# Altium footprint library Footprint_Vlad.PcbLib: 392 footprints (part 9 of 25)
Each footprint in its own frame and in the unit in brackets; x right, y up, seen from the top. Pads: shape width x height; smd on the part's side, far side on the other; paste and mask are expansions set on the pad; w line width, h text height; cw(c..) or ccw(c..) is an arc to the next point about the centre after c.
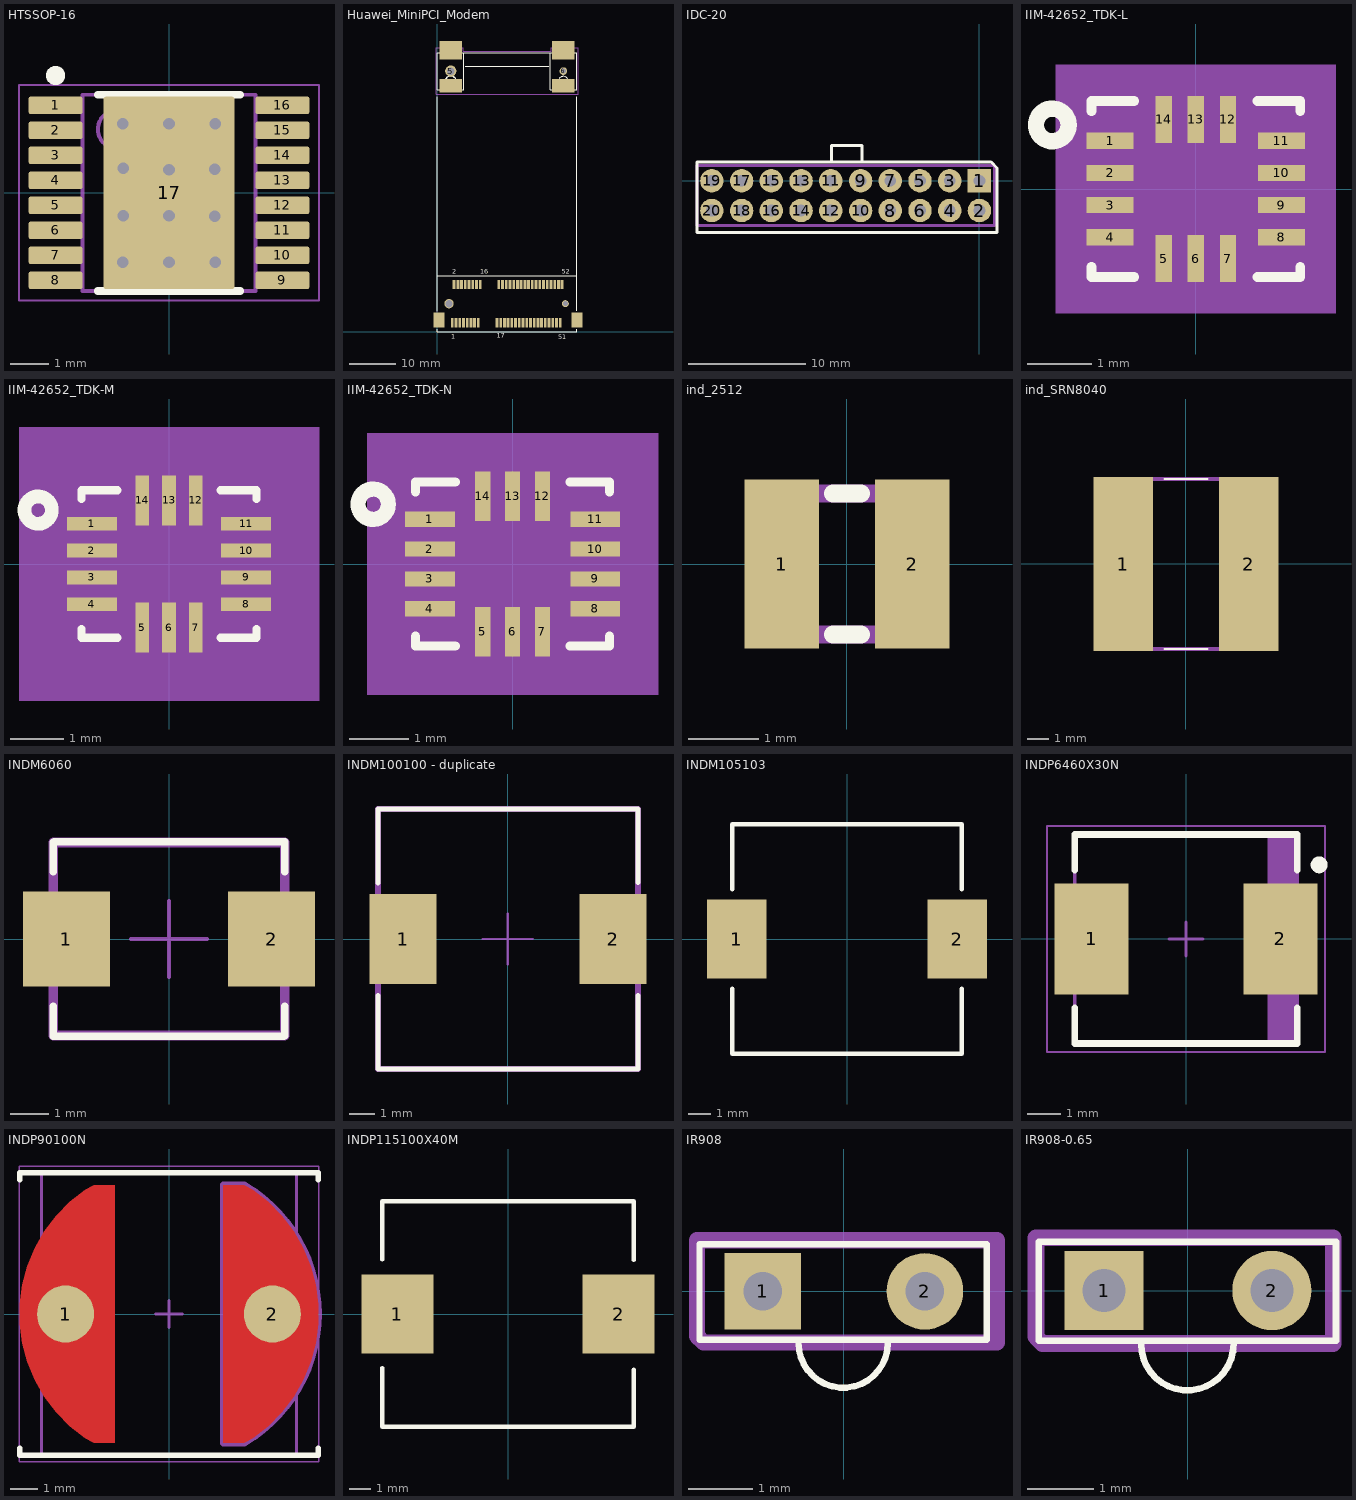
[diagram p8: the footprints below, top view; thin cyan lines are the x and y axes]

## HTSSOP-16 [mm] "SOP, 16-Leads, Body 5.1x4.5mm, Pitch 0.65mm, Thermal Pad 2.46x2.31mm, IPC Medium Density"
height 1.2
pads (17):
  rrect22% 1.4x0.45 smd: 1(-2.95,2.275) 2(-2.95,1.625) 3(-2.95,0.975) 4(-2.95,0.325) 5(-2.95,-0.325) 6(-2.95,-0.975) 7(-2.95,-1.625) 8(-2.95,-2.275) 9(2.95,-2.275) 10(2.95,-1.625) 11(2.95,-0.975) 12(2.95,-0.325) 13(2.95,0.325) 14(2.95,0.975) 15(2.95,1.625) 16(2.95,2.275)
  rrect3% 3.4x5 smd paste-1.7 mask-1.7: 17(0,0)
via 0,1.8 diameter 0.6 hole 0.3
via -1.2,1.8 diameter 0.6 hole 0.3
via 1.2,1.8 diameter 0.6 hole 0.3
via -1.2,-1.8 diameter 0.6 hole 0.3
via 0,-1.8 diameter 0.6 hole 0.3
via 1.2,-1.8 diameter 0.6 hole 0.3
via 0,0.6 diameter 0.6 hole 0.3
via 0,-0.6 diameter 0.6 hole 0.3
via -1.194,-0.6 diameter 0.6 hole 0.3
via 1.194,-0.61 diameter 0.6 hole 0.3
via 1.194,0.61 diameter 0.6 hole 0.3
via -1.194,0.635 diameter 0.6 hole 0.3
Top Overlay:
  circle w0.25: c-2.95,3.05 r0.125
  lines w0.2: -1.85,-2.55 1.85,-2.55 ; -1.85,2.55 1.85,2.55
Top Solder:
  lines w0.2: -1.2,1.8 -1.194,1.8 ; 1.194,1.8 1.2,1.8
Mechanical 1:
  text ".Designator" at -1.778,3.048 h1.02
Mechanical 13:
  circle w0.1: c-1.35,1.65 r0.5
  lines w0.1: -2.25,-2.55 2.25,-2.55 2.25,2.55 -2.25,2.55 -2.25,-2.55
Mechanical 15:
  lines w0.05: -3.9,-2.8 3.9,-2.8 3.9,2.8 -3.9,2.8 -3.9,-2.8
  lines w0.1: -0.5,0 0.5,0 ; 0,-0.5 0,0.5
3D body "MXA16A.stp": height 1, standoff 0, extent -3.209,-2.5 3.209,2.5

## Huawei_MiniPCI_Modem [mm]
pads (62):
  rect 0.6x2 smd: 1(3.225,1.925) 2(3.625,10.125) 3(4.025,1.925) 4(4.425,10.125) 5(4.825,1.925) 6(5.225,10.125) 7(5.625,1.925) 8(6.025,10.125) 9(6.425,1.925) 10(6.825,10.125) 11(7.225,1.925) 12(7.625,10.125) 13(8.025,1.925) 14(8.425,10.125) 15(8.825,1.925) 16(9.225,10.125) 17(12.825,1.925) 18(13.225,10.125) 19(13.625,1.925) 20(14.025,10.125) 21(14.425,1.925) 22(14.825,10.125) 23(15.225,1.925) 24(15.625,10.125) 25(16.025,1.925) 26(16.425,10.125) 27(16.825,1.925) 28(17.225,10.125) 29(17.625,1.925) 30(18.025,10.125) 31(18.425,1.925) 32(18.825,10.125) 33(19.225,1.925) 34(19.625,10.125) 35(20.025,1.925) 36(20.425,10.125) 37(20.825,1.925) 38(21.225,10.125) 39(21.625,1.925) 40(22.025,10.125) 41(22.425,1.925) 42(22.825,10.125) 43(23.225,1.925) 44(23.625,10.125) 45(24.025,1.925) 46(24.425,10.125) 47(24.825,1.925) 48(25.225,10.125) 49(25.625,1.925) 50(26.025,10.125) 51(26.425,1.925) 52(26.825,10.125)
  round 2.4 hole 1.6: 5(2.9,56)
  round 1.65 hole 1.1: 6(27.1,56)
  rect 2.3x3.2 smd: ""(0.375,2.525) ""(30.025,2.525)
  round 2 hole 1.6: ""(2.525,6.025)
  rect 4.8x3 smd: ""(2.9,52.85) ""(27.1,52.85)
  rect 4.8x4 smd: ""(2.9,60.5) ""(27.1,60.5)
  round 1.5 hole 1.1: ""(27.525,6.025)
Top Overlay:
  circle w0.254: c27.1,53.75 r1.1
  circle w0.254: c2.9,53.75 r1.15
  circle w0.254: c2.9,53.75 r1.25
  lines w0.15: 0.025,0.525 0.025,0.025 30.025,0.025 30.025,0.525 ; 0.025,4.425 0.025,12.025 ; 0.025,50.525 0.025,12.025 ; 6.025,57.025 23.925,57.025 ; 30.025,4.525 30.025,12.025 ; 30.025,50.525 30.025,12.025 ; 0.025,12.025 30.025,12.025
  lines w0.152: 0,52.025 0,59.975 ; 0,52.025 0,59.975 ; 0,52.025 5.73,52.025 ; 0,52.025 5.73,52.025 ; 0,59.975 5.73,59.975 ; 0,59.975 5.73,59.975 ; 5.73,52.025 5.73,59.975 ; 5.73,52.025 5.73,59.975 ; 5.73,59.975 24.27,59.975 ; 5.73,59.975 24.27,59.975 ; 24.27,52.025 24.27,59.975 ; 24.27,52.025 24.27,59.975 ; 24.27,52.025 30,52.025 ; 24.27,52.025 30,52.025 ; 24.27,59.975 30,59.975 ; 24.27,59.975 30,59.975 ; 30,52.025 30,59.975 ; 30,52.025 30,59.975
  text "1" at 3.025,-1.475 h1
  text "2" at 3.225,12.425 h1
  text "51" at 26.025,-1.575 h1
  text "52" at 26.725,12.425 h1
  text "17" at 12.825,-1.275 h1
  text "16" at 9.225,12.425 h1
Mechanical 15:
  lines w0.2: -0.25,51 -0.25,61 5.575,61 5.575,60.225 24.45,60.225 24.45,61 30.25,61 30.25,51 -0.25,51
3D body "679100002.stp": height 4.1, standoff -0.5, extent -0.003,0.945 29.997,11.145
3D body "Mini PCI Express Card 1mm Thick, 52 Pin, 0.8mm Pitch.STEP": height 2.55, standoff 1.45, extent -0.014,5.588 29.986,56.538
3D body "480994000.stp": height 4.85, standoff -0.7, extent 0.775,51.771 29.225,61.131

## IDC-20 [mm]
pads (20):
  rect 2x2 hole 1: 1(0,0)
  round 2 hole 1: 2(0,-2.54) 3(-2.54,0) 4(-2.54,-2.54) 5(-5.08,0) 6(-5.08,-2.54) 7(-7.62,0) 8(-7.62,-2.54) 9(-10.15,0) 10(-10.15,-2.54) 11(-12.7,0) 12(-12.7,-2.54) 13(-15.24,0) 14(-15.24,-2.54) 15(-17.78,0) 16(-17.78,-2.54) 17(-20.32,0) 18(-20.32,-2.54) 19(-22.86,0) 20(-22.86,-2.54)
Top Overlay:
  lines w0.254: -12.65,1.6 -12.65,3 -10.05,3 -10.05,1.6 ; -24.13,-4.4 -24.13,1.6 1,1.6 1.5,1.1 1.5,-4.4 -24.13,-4.4
Mechanical 15:
  circle w0.254: c0,0 r0.1
  lines w0.254: -24.13,-3.8 1.3,-3.8 1.3,1.3 -24.13,1.3 -24.13,-3.8
  text ".Designator" at -11.2,1.6 h1.52
3D body "User Library-DS1013-20S (IDC-20MS CONNFLY).STEP": height 9, standoff -3.6, extent -28.03,-5.67 5.17,3.23

## IIM-42652_TDK-L [mm]
pads (14):
  rect 0.733x0.255 smd paste+0 mask+0: 1(-1.333,0.75) 2(-1.333,0.25) 3(-1.333,-0.25) 4(-1.333,-0.75) 8(1.333,-0.75) 9(1.333,-0.25) 10(1.333,0.25) 11(1.333,0.75)
  rect 0.255x0.733 smd paste+0 mask+0: 5(-0.5,-1.083) 6(0,-1.083) 7(0.5,-1.083) 12(0.5,1.083) 13(0,1.083) 14(-0.5,1.083)
Top Overlay:
  circle w0.254: c-2.235,0.998 r0.254
  lines w0.152: -1.626,-1.21 -1.626,-1.372 -0.96,-1.372 ; -1.626,1.21 -1.626,1.372 -0.96,1.372 ; 0.96,-1.372 1.626,-1.372 1.626,-1.21 ; 0.96,1.372 1.626,1.372 1.626,1.21
Assembly Bottom:
  region: 2.183,-1.933 -2.183,-1.933 -2.183,1.933 2.183,1.933
Mechanical 13:
  lines w0.025: -1.499,-0.025 -0.229,1.245 ; -1.5,-0.902 -1.499,-0.902 -1.499,-0.598 -1.5,-0.598 -1.5,-0.902 ; -1.5,-0.402 -1.499,-0.402 -1.499,-0.098 -1.5,-0.098 -1.5,-0.402 ; -1.5,0.098 -1.499,0.098 -1.499,0.402 -1.5,0.402 -1.5,0.098 ; -1.5,0.598 -1.499,0.598 -1.499,0.902 -1.5,0.902 -1.5,0.598 ; -1.499,-1.245 -1.499,1.245 1.499,1.245 1.499,-1.245 -1.499,-1.245 ; -0.652,-1.25 -0.348,-1.25 -0.348,-1.245 -0.652,-1.245 -0.652,-1.25 ; -0.652,1.245 -0.652,1.25 -0.348,1.25 -0.348,1.245 -0.652,1.245 ; -0.152,-1.25 0.152,-1.25 0.152,-1.245 -0.152,-1.245 -0.152,-1.25 ; -0.152,1.245 -0.152,1.25 0.152,1.25 0.152,1.245 -0.152,1.245 ; 0.348,-1.25 0.652,-1.25 0.652,-1.245 0.348,-1.245 0.348,-1.25 ; 0.348,1.245 0.348,1.25 0.652,1.25 0.652,1.245 0.348,1.245 ; 1.499,-0.902 1.5,-0.902 1.5,-0.598 1.499,-0.598 1.499,-0.902 ; 1.499,-0.402 1.5,-0.402 1.5,-0.098 1.499,-0.098 1.499,-0.402 ; 1.499,0.098 1.5,0.098 1.5,0.402 1.499,0.402 1.499,0.098 ; 1.499,0.598 1.5,0.598 1.5,0.902 1.499,0.902 1.499,0.598
  text "*" at -1.284,0.365 h1.27
Mechanical 15:
  region: -0.729,-1.346 -1.6,-1.346 -1.6,-0.979 -1.802,-0.979 -1.802,0.979 -1.6,0.979 -1.6,1.346 -0.729,1.346 -0.729,1.552 0.729,1.552 0.729,1.346 1.6,1.346 1.6,0.979 1.802,0.979 1.802,-0.979 1.6,-0.979 1.6,-1.346 0.729,-1.346 0.729,-1.552 -0.729,-1.552
  lines w0.152: -1.802,-0.979 -1.802,0.979 -1.6,0.979 -1.6,1.346 -0.729,1.346 -0.729,1.552 0.729,1.552 0.729,1.346 1.6,1.346 1.6,0.979 1.802,0.979 1.802,-0.979 1.6,-0.979 1.6,-1.346 0.729,-1.346 0.729,-1.552 -0.729,-1.552 -0.729,-1.346 -1.6,-1.346 -1.6,-0.979 -1.802,-0.979
3D body "IIM-42652_TDK.step": height 1.65, standoff 0, extent -1.5,-1.25 1.5,1.25

## IIM-42652_TDK-M [mm]
pads (14):
  rect 0.933x0.255 smd paste+0 mask+0: 1(-1.433,0.75) 2(-1.433,0.25) 3(-1.433,-0.25) 4(-1.433,-0.75) 8(1.433,-0.75) 9(1.433,-0.25) 10(1.433,0.25) 11(1.433,0.75)
  rect 0.255x0.933 smd paste+0 mask+0: 5(-0.5,-1.183) 6(0,-1.183) 7(0.5,-1.183) 12(0.5,1.183) 13(0,1.183) 14(-0.5,1.183)
Top Overlay:
  circle w0.254: c-2.433,1.003 r0.254
  lines w0.152: -1.626,-1.21 -1.626,-1.372 -0.96,-1.372 ; -1.626,1.21 -1.626,1.372 -0.96,1.372 ; 0.96,-1.372 1.626,-1.372 1.626,-1.21 ; 0.96,1.372 1.626,1.372 1.626,1.21
Assembly Bottom:
  region: 2.789,-2.539 -2.789,-2.539 -2.789,2.539 2.789,2.539
Mechanical 13:
  lines w0.025: -1.499,-0.025 -0.229,1.245 ; -1.5,-0.902 -1.5,-0.598 -1.499,-0.598 -1.499,-0.902 -1.5,-0.902 ; -1.5,-0.402 -1.5,-0.098 -1.499,-0.098 -1.499,-0.402 -1.5,-0.402 ; -1.5,0.098 -1.5,0.402 -1.499,0.402 -1.499,0.098 -1.5,0.098 ; -1.5,0.598 -1.5,0.902 -1.499,0.902 -1.499,0.598 -1.5,0.598 ; -1.499,-1.245 1.499,-1.245 1.499,1.245 -1.499,1.245 -1.499,-1.245 ; -0.652,-1.25 -0.652,-1.245 -0.348,-1.245 -0.348,-1.25 -0.652,-1.25 ; -0.652,1.245 -0.348,1.245 -0.348,1.25 -0.652,1.25 -0.652,1.245 ; -0.152,-1.25 -0.152,-1.245 0.152,-1.245 0.152,-1.25 -0.152,-1.25 ; -0.152,1.245 0.152,1.245 0.152,1.25 -0.152,1.25 -0.152,1.245 ; 0.348,-1.25 0.348,-1.245 0.652,-1.245 0.652,-1.25 0.348,-1.25 ; 0.348,1.245 0.652,1.245 0.652,1.25 0.348,1.25 0.348,1.245 ; 1.499,-0.902 1.499,-0.598 1.5,-0.598 1.5,-0.902 1.499,-0.902 ; 1.499,-0.402 1.499,-0.098 1.5,-0.098 1.5,-0.402 1.499,-0.402 ; 1.499,0.098 1.499,0.402 1.5,0.402 1.5,0.098 1.499,0.098 ; 1.499,0.598 1.499,0.902 1.5,0.902 1.5,0.598 1.499,0.598
  text "*" at -1.284,0.365 h1.27
Mechanical 15:
  region: -1.135,-1.753 -2.007,-1.753 -2.007,-1.385 -2.408,-1.385 -2.408,1.385 -2.007,1.385 -2.007,1.753 -1.135,1.753 -1.135,2.158 1.135,2.158 1.135,1.753 2.007,1.753 2.007,1.385 2.408,1.385 2.408,-1.385 2.007,-1.385 2.007,-1.753 1.135,-1.753 1.135,-2.158 -1.135,-2.158
  lines w0.152: -2.408,-1.385 -2.007,-1.385 -2.007,-1.753 -1.135,-1.753 -1.135,-2.158 1.135,-2.158 1.135,-1.753 2.007,-1.753 2.007,-1.385 2.408,-1.385 2.408,1.385 2.007,1.385 2.007,1.753 1.135,1.753 1.135,2.158 -1.135,2.158 -1.135,1.753 -2.007,1.753 -2.007,1.385 -2.408,1.385 -2.408,-1.385
3D body "IIM-42652_TDK.step": height 1.65, standoff 0, extent -1.5,-1.25 1.5,1.25

## IIM-42652_TDK-N [mm]
pads (14):
  rect 0.833x0.255 smd paste+0 mask+0: 1(-1.383,0.75) 2(-1.383,0.25) 3(-1.383,-0.25) 4(-1.383,-0.75) 8(1.383,-0.75) 9(1.383,-0.25) 10(1.383,0.25) 11(1.383,0.75)
  rect 0.255x0.833 smd paste+0 mask+0: 5(-0.5,-1.133) 6(0,-1.133) 7(0.5,-1.133) 12(0.5,1.133) 13(0,1.133) 14(-0.5,1.133)
Top Overlay:
  circle w0.254: c-2.333,1 r0.254
  lines w0.152: -1.626,-1.21 -1.626,-1.372 -0.96,-1.372 ; -1.626,1.21 -1.626,1.372 -0.96,1.372 ; 0.96,-1.372 1.626,-1.372 1.626,-1.21 ; 0.96,1.372 1.626,1.372 1.626,1.21
Assembly Bottom:
  region: 2.435,-2.185 -2.435,-2.185 -2.435,2.185 2.435,2.185
Mechanical 13:
  lines w0.025: -1.499,-0.025 -0.229,1.245 ; -1.5,-0.902 -1.5,-0.598 -1.499,-0.598 -1.499,-0.902 -1.5,-0.902 ; -1.5,-0.402 -1.5,-0.098 -1.499,-0.098 -1.499,-0.402 -1.5,-0.402 ; -1.5,0.098 -1.5,0.402 -1.499,0.402 -1.499,0.098 -1.5,0.098 ; -1.5,0.598 -1.5,0.902 -1.499,0.902 -1.499,0.598 -1.5,0.598 ; -1.499,-1.245 1.499,-1.245 1.499,1.245 -1.499,1.245 -1.499,-1.245 ; -0.652,-1.25 -0.652,-1.245 -0.348,-1.245 -0.348,-1.25 -0.652,-1.25 ; -0.652,1.245 -0.348,1.245 -0.348,1.25 -0.652,1.25 -0.652,1.245 ; -0.152,-1.25 -0.152,-1.245 0.152,-1.245 0.152,-1.25 -0.152,-1.25 ; -0.152,1.245 0.152,1.245 0.152,1.25 -0.152,1.25 -0.152,1.245 ; 0.348,-1.25 0.348,-1.245 0.652,-1.245 0.652,-1.25 0.348,-1.25 ; 0.348,1.245 0.652,1.245 0.652,1.25 0.348,1.25 0.348,1.245 ; 1.499,-0.902 1.499,-0.598 1.5,-0.598 1.5,-0.902 1.499,-0.902 ; 1.499,-0.402 1.499,-0.098 1.5,-0.098 1.5,-0.402 1.499,-0.402 ; 1.499,0.098 1.499,0.402 1.5,0.402 1.5,0.098 1.499,0.098 ; 1.499,0.598 1.499,0.902 1.5,0.902 1.5,0.598 1.499,0.598
  text "*" at -1.284,0.365 h1.27
Mechanical 15:
  region: -0.881,-1.499 -1.753,-1.499 -1.753,-1.131 -2.054,-1.131 -2.054,1.131 -1.753,1.131 -1.753,1.499 -0.881,1.499 -0.881,1.804 0.881,1.804 0.881,1.499 1.753,1.499 1.753,1.131 2.054,1.131 2.054,-1.131 1.753,-1.131 1.753,-1.499 0.881,-1.499 0.881,-1.804 -0.881,-1.804
  lines w0.152: -2.054,-1.131 -1.753,-1.131 -1.753,-1.499 -0.881,-1.499 -0.881,-1.804 0.881,-1.804 0.881,-1.499 1.753,-1.499 1.753,-1.131 2.054,-1.131 2.054,1.131 1.753,1.131 1.753,1.499 0.881,1.499 0.881,1.804 -0.881,1.804 -0.881,1.499 -1.753,1.499 -1.753,1.131 -2.054,1.131 -2.054,-1.131
3D body "IIM-42652_TDK.step": height 1.65, standoff 0, extent -1.5,-1.25 1.5,1.25

## ind_2512 [mm]
pads (2):
  rect 1.05x2.4 smd: 1(-0.925,0) 2(0.925,0)
Top Overlay:
  lines w0.254: -0.2,-1 0.2,-1 ; -0.2,1 0.2,1
Mechanical 13:
  lines w0.254: -1.25,-1 -1.25,1 1.25,1 1.25,-1 -1.25,-1

## ind_SRN8040 [mm]
pads (2):
  rect 2.8x8.2 smd: 1(-2.95,0) 2(2.95,0)
Top Overlay:
  lines w0.1: -1,-4 1,-4 ; -1,4 1,4
Mechanical 13:
  lines w0.2: -4,-4 4,-4 4,4 -4,4 -4,-4
3D body "SRN8040-2R2Y.stp": height 4, standoff 0, extent -4,-4 4,4

## INDM6060 [mm] "Moulded inductor 6x6mm"
height 4
pads (2):
  rect 2.3x2.5 smd: 1(-2.7,0) 2(2.7,0)
Top Overlay:
  lines w0.2: -3.048,-1.778 -3.048,-2.565 3.023,-2.565 ; -3.048,1.778 -3.048,2.54 ; -3.023,2.565 3.048,2.565 3.048,1.778 ; 3.048,-2.54 3.048,-1.778
Mechanical 15:
  lines w0.1: -1,0 1,0 ; 0,-1 0,1
  lines w0.254: -3.048,-2.54 3.048,-2.54 3.048,2.54 -3.048,2.54 -3.048,-2.54
  text ".Designator" at -5.1,5.5 h1.52
3D body "User Library-SMDinductor.step": height 2.9, standoff 0, extent -2.95,-2.6 2.95,2.6

## INDM100100 - duplicate [mm] "Moulded inductor 10x10mm"
height 4
pads (2):
  rect 2.7x3.6 smd: 1(-4.2,0) 2(4.2,0)
Top Overlay:
  lines w0.2: -5.2,-2.25 -5.2,-5.2 -0.4,-5.2 5.2,-5.2 5.2,-2.25 ; -5.2,2.25 -5.198,5.2 ; -5.2,5.2 -0.4,5.2 5.2,5.2 5.2,2.25
Mechanical 15:
  lines w0.1: -1,0 1,0 ; 0,-1 0,1
  lines w0.254: -5.2,-5.2 -5.2,5.2 5.2,5.2 5.2,-5.2 -5.2,-5.2
  text ".Designator" at -5.1,5.5 h1.52
3D body "User Library-B82464G4.step": height 4.81, standoff 0, extent -5.2,-5.2 5.2,5.2

## INDM105103 [mm] "Moulded inductor 10x10mm"
height 4
pads (2):
  rect 2.7x3.6 smd: 1(-5,0) 2(5,0)
Top Overlay:
  lines w0.2: -5.2,-2.25 -5.2,-5.2 -0.4,-5.2 5.2,-5.2 5.2,-2.25 ; -5.2,2.25 -5.198,5.2 ; -5.2,5.2 -0.4,5.2 5.2,5.2 5.2,2.25
3D body "User Library-cdrh104r.STEP": height 4, standoff 0, extent -5.277,-5.095 5.223,5.205

## INDP6460X30N [mm] "Precision Wire Wound Inductor, 2-Leads, Body 6,40x6,00mm, IPC Medium Density"
height 3
pads (2):
  rect 2.2x3.3 smd: 1(-2.8,0) 2(2.8,0)
Top Overlay:
  circle w0.25: c3.95,2.2 r0.125
  lines w0.2: -3.3,-2.05 -3.3,-3.1 3.3,-3.1 3.3,-2.05 ; -3.3,2.05 -3.3,3.1 3.3,3.1 3.3,2.05
Assembly Top:
  rectangle: 2.412,-3.1 3.3,3.1
  lines w0.1: -3.3,-3.1 -3.3,3.1 3.3,3.1 3.3,-3.1 -3.3,-3.1
Courtyard Top:
  lines w0.05: -4.125,-3.35 -4.125,3.35 4.125,3.35 4.125,-3.35 -4.125,-3.35
  lines w0.1: -0.5,0 0.5,0 ; 0,-0.5 0,0.5
3D body "INDP6460X30N.step": height 3.1, standoff 0, extent -3.3,-3 3.3,3

## INDP90100N [mm] "Precision Wire Wound Inductor, 2-Leads, Body 9,00x10,00mm, IPC Medium Density"
height 5.5
pads (2):
  round 2.1 smd: 1(-3.81,0) 2(3.81,0)
Top Layer:
  region: 2,-4.75 2.774,-4.75 2.774,-4.749 3.084,-4.568 3.651,-4.129 4.156,-3.62 4.591,-3.049 4.949,-2.427 5.222,-1.764 5.407,-1.07 5.5,-0.359 5.5,0.358 5.407,1.07 5.222,1.763 4.949,2.427 4.592,3.049 4.157,3.619 3.651,4.129 3.084,4.568 2.774,4.749 2.774,4.75 2,4.75
  region: -2,-4.75 -2.774,-4.75 -2.774,-4.749 -3.084,-4.568 -3.651,-4.129 -4.156,-3.62 -4.591,-3.049 -4.949,-2.427 -5.222,-1.764 -5.407,-1.07 -5.5,-0.359 -5.5,0.358 -5.407,1.07 -5.222,1.763 -4.949,2.427 -4.592,3.049 -4.157,3.619 -3.651,4.129 -3.084,4.568 -2.774,4.749 -2.774,4.75 -2,4.75
Top Overlay:
  lines w0.2: -5.5,-4.95 -5.5,-5.2 5.5,-5.2 5.5,-4.95 ; -5.5,4.95 -5.5,5.2 5.5,5.2 5.5,4.95
Mechanical 3:
  lines w0.254: 2.774,-4.749 ccw(c0,0) 2.774,4.749 ; 2.774,-4.75 2,-4.75 2,4.75 2.774,4.75
Mechanical 13:
  lines w0.1: -4.7,-5.2 4.7,-5.2 4.7,5.2 -4.7,5.2 -4.7,-5.2
Mechanical 15:
  lines w0.05: -5.525,-5.45 5.525,-5.45 5.525,5.45 -5.525,5.45 -5.525,-5.45
  lines w0.1: -0.5,0 0.5,0 ; 0,-0.5 0,0.5
  text ".Designator" at -4.75,5.5 h1.52
3D body: height 2.54, standoff -2.54, extent -2.528,-2.537 2.54,2.537

## INDP115100X40M [mm] "Precision Wire Wound Inductor, 2-Leads, Body 11,50x10,00mm, IPC Low Density"
height 4
pads (2):
  rect 3.3x3.6 smd: 1(-5.05,0) 2(5.05,0)
Top Overlay:
  lines w0.2: -5.75,-2.464 -5.75,-5.15 5.75,-5.15 5.75,-2.54 ; -5.75,2.489 -5.75,5.15 5.75,5.15 5.75,2.464
3D body "74437368033.stp": height 3.8, standoff 0, extent -5.5,-5 5.5,5

## IR908 [mm]
pads (2):
  rect 1.2x1.2 hole 0.6: 1(-1.27,0)
  round 1.2 hole 0.6: 2(1.27,0)
Top Overlay:
  lines w0.1: -0.71,-0.81 ccw(c-0.01,-0.81) 0.69,-0.81 ; -2.26,-0.76 2.24,-0.76 2.24,0.74 -2.26,0.74 -2.26,-0.76
Mechanical 15:
  circle w0.254: c-1.2,0 r0.3
  lines w0.254: -2.3,-0.7 -2.2,-0.8 2.4,-0.8 2.4,0.8 -2.3,0.8 -2.3,-0.7
  text ".Designator" at -2.2,1 h1.52

## IR908-0.65 [mm]
pads (2):
  rect 1.2x1.2 hole 0.65: 1(-1.27,0)
  round 1.2 hole 0.65: 2(1.27,0)
Top Overlay:
  lines w0.1: -0.71,-0.81 ccw(c-0.01,-0.81) 0.69,-0.81 ; -2.26,-0.76 -2.26,0.74 2.24,0.74 2.24,-0.76 -2.26,-0.76
Mechanical 15:
  circle w0.254: c-1.2,0 r0.1
  lines w0.254: -2.3,-0.7 -2.2,-0.8 2.2,-0.8 2.2,0.8 -2.3,0.8 -2.3,-0.7
  text ".Designator" at -2.4,1 h1.52